# Altium schematic symbol library Regulator.SchLib: 250 symbols (part 2 of 6)
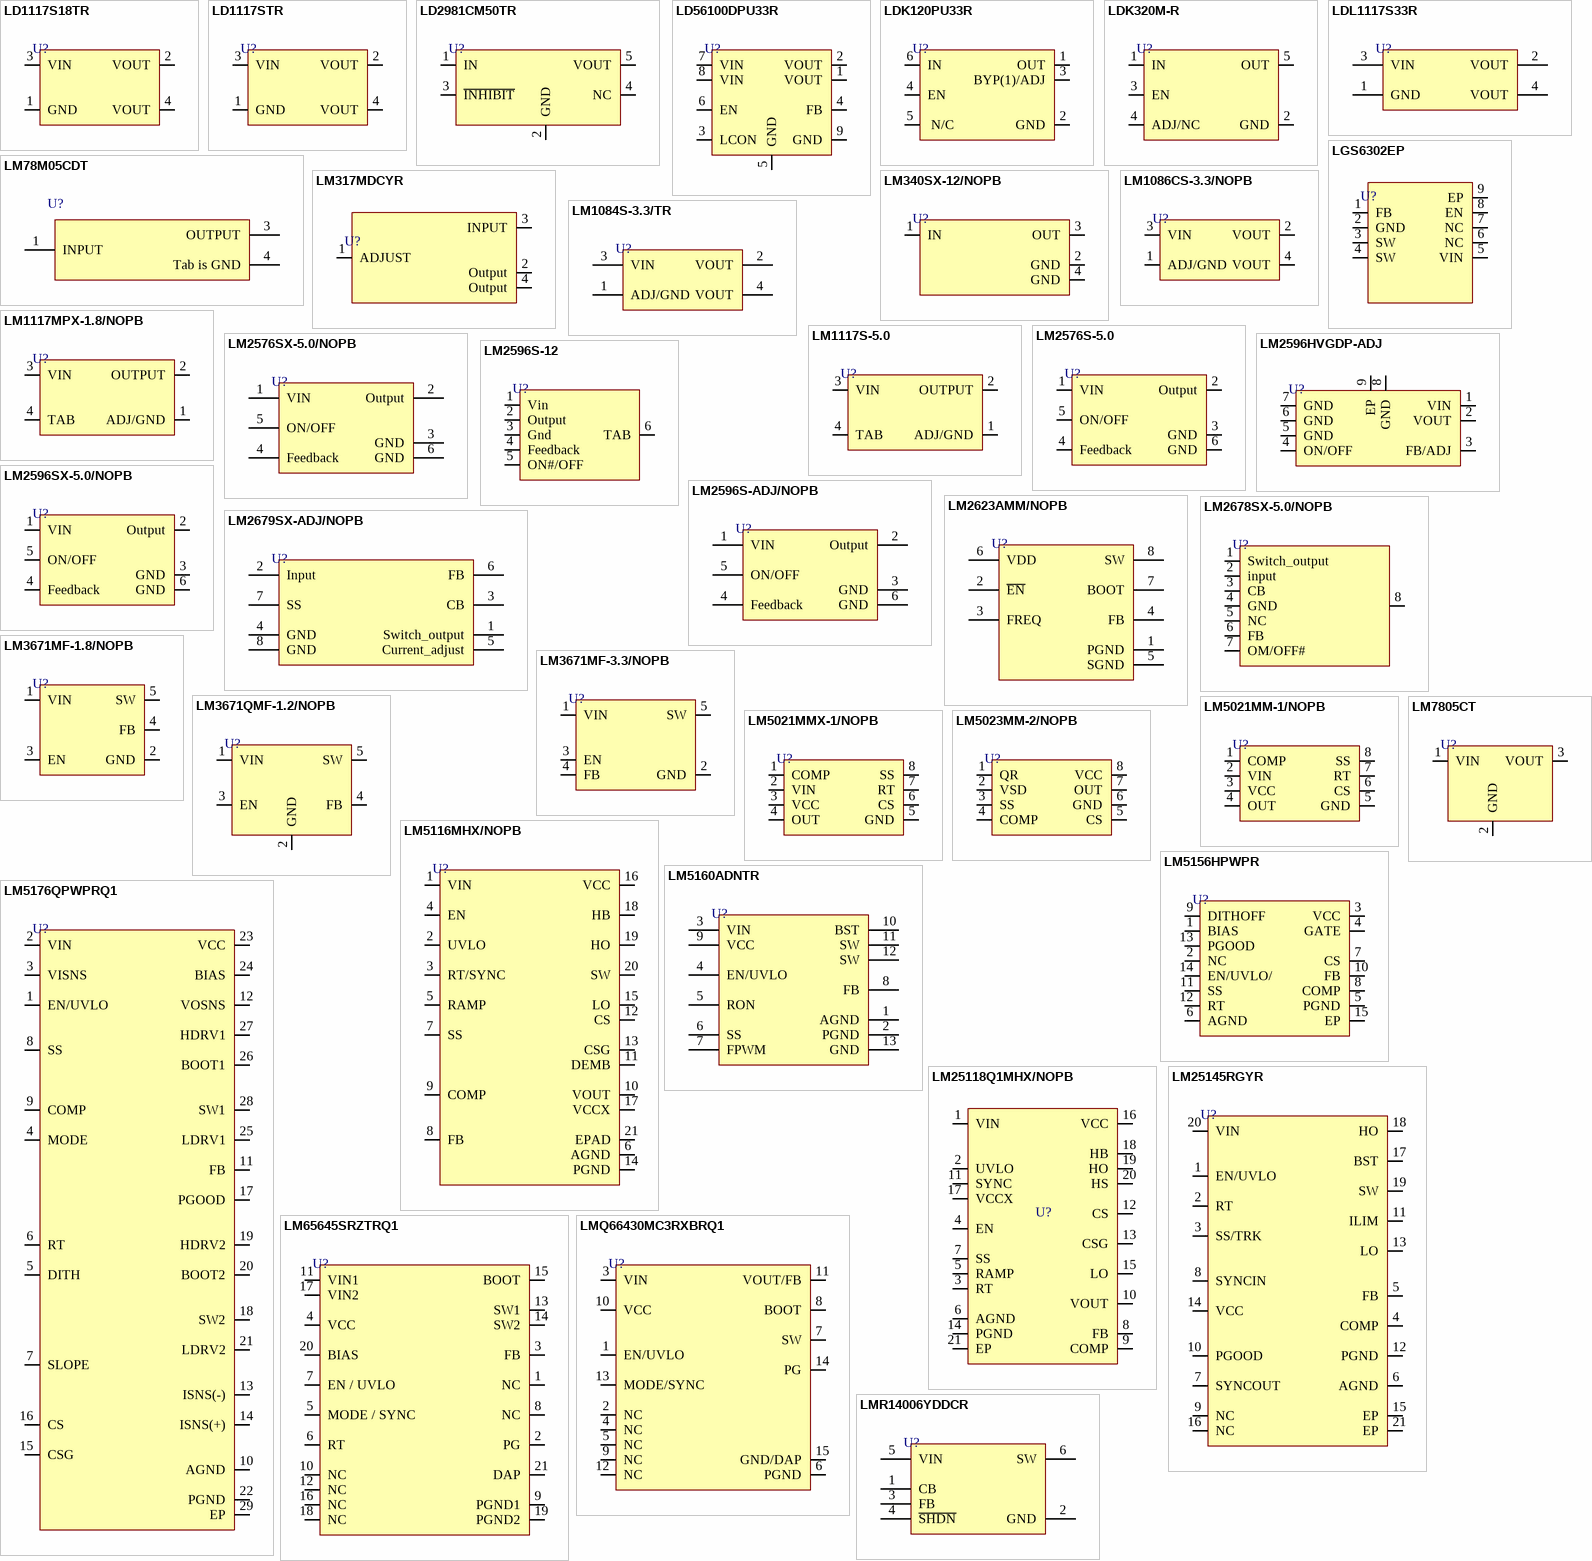
[diagram p7: symbols LD1117S18TR to LMR14006YDDCR]

## LD2981CM50TR
designator U?
LD2981 Series 100 mA 5 V Fixed Output LDO Regulator with Inhibit - SOT-23-5; Manufacturer: STMicroelectronics; Manufacturer Part Number: LD2981CM50TR; Item Type: IC; JLC Part Number: C157380; ComponentLink1Description: JLCPCB; ComponentLink1URL: https://jlcpcb.com/kr/partdetail/Stmicroelectronics-LD2981CM50TR/C157380; Supplier: Digikey; Supplier Part Number: 497-7787-1-ND; RoHS: Yes; Category: Voltage Regulators - Linear; Stock: 17151; Pricing: 1=0.93, 10=0.83, 25=0.788, 100=0.6474, 250=0.60512, 500=0.53476, 1000=0.42219 (USD); ComponentLink2URL: https://datasheet.ciiva.com/2043/cd00001635-2043543.pdf?src-supplier=Digikey; ComponentLink2Description: https://datasheet.ciiva.com/2043/cd00001635-2043543.pdf?src-supplier=Digikey; ComponentLink3URL: https://datasheet.ciiva.com/2043/cd00001635-2043544.pdf?src-supplier=Digikey; ComponentLink3Description: https://datasheet.ciiva.com/2043/cd00001635-2043544.pdf?src-supplier=Digikey; ComponentLink4URL: https://datasheet.ciiva.com/2043/cd00001635-2043545.pdf?src-supplier=Digikey; ComponentLink4Description: https://datasheet.ciiva.com/2043/cd00001635-2043545.pdf?src-supplier=Digikey; ComponentLink5URL: https://datasheet.ciiva.com/16443/cd00001635-16443657.pdf?src-supplier=Future+Electronics; ComponentLink5Description: https://datasheet.ciiva.com/16443/cd00001635-16443657.pdf?src-supplier=Future+Electronics
footprint SOT-23-5
pins: 1 IN, 2 GND, 3 ~{INHIBIT}, 4 NC, 5 VOUT

## LD56100DPU33R
designator U?
IC REG LINEAR 3.3V 1A 8DFN; Manufacturer: STMicroelectronics; Manufacturer Part Number: LD56100DPU33R; Output Type: Fixed; Output Configuration: Positive; Number of Regulators: 1; Max Supply Voltage: 5.5V; Quiescent Current: 155uA; Power Supply Rejection Ratio (PSRR): 55dB; Supplier: Mouser; LCSC Part Number: C2969937; RoHS: Yes; Item Type: IC; Pricing: 1=1.23, 10=0.751, 50=0.751, 100=0.479, 1000=0.326, 10000=0.229 (USD); Mounting Technology: Surface Mount; Case/Package: DFN; Min Operating Temperature: -40°C; Max Operating Temperature: 85°C; Packaging: Cut Tape; Min Output Voltage: 3.3V; Output Current: 1A; Series: -; RoHS Compliant: Yes; ComponentLink1URL: https://www.st.com/resource/en/datasheet/ld56100.pdf?src-supplier=Digikey; ComponentLink1Description: https://www.st.com/resource/en/datasheet/ld56100.pdf?src-supplier=Digikey
footprint Model Name (Footprint not found)
footprint DFN-8(1.2x1.6)
pins: 1 VOUT, 2 VOUT, 3 LCON, 4 FB, 5 GND, 6 EN, 7 VIN, 8 VIN, 9 GND

## LDK120PU33R
designator U?
IC REG LINEAR 3.3V 200MA 6DFN; Manufacturer: STMicroelectronics; Manufacturer Part Number: LDK120PU33R; Number of Outputs: 1; Min Input Voltage: 1.9V; Max Supply Voltage: 5.5V; Dropout Voltage: 150mV; Polarity: Positive; Quiescent Current: 60uA; Accuracy: 2%; Operating Supply Current: 50uA; Power Supply Rejection Ratio (PSRR): 55dB; Output Type: Fixed; Supplier 1: Mouser; RoHS: Yes; Category: Voltage Regulators - Linear; Stock 1: 1169; Pricing 1: 1=0.91, 10=0.752, 50=0.752, 100=0.614, 1000=0.388, 10000=0.343 (USD); Mounting Technology: Surface Mount; Case/Package: DFN; Pins: 6; Min Operating Temperature: -40°C; Max Operating Temperature: 125°C; Packaging: Tape and Reel; Max Output current: 200mA; Output Voltage: 3.3V; Output Current: 200mA; Number of Regulators: 1; Nominal Output Voltage: 3.3V; Package Quantity: 6000; Series: -; Length: 1.3mm; Width: 1.2mm; Height: 0.45mm; Radiation Hardening: No; Reach SVHC Compliant: No; Lead Free: Lead Free; RoHS Compliant: Yes; ComponentLink1URL: https://datasheet.ciiva.com/48475/dm00070790-48475005.pdf?src-supplier=Avnet; ComponentLink1Description: https://datasheet.ciiva.com/48475/dm00070790-48475005.pdf?src-supplier=Avnet; Supplier Part Number 1: 511-LDK120PU33R; LCSC Part Number: C2971162; Item Type: IC
footprint 6-DFN (1.2x1.3)
pins: 1 OUT, 2 GND, 3 BYP(1)/ADJ, 4 EN, 5  N/C, 6 IN

## LDK320M-R
designator U?
IC REG LIN POS ADJ 200MA SOT23-5; Manufacturer: STMicroelectronics; Manufacturer Part Number: LDK320M-R; Output Type: Adjustable; Output Configuration: Positive; Number of Regulators: 1; Max Supply Voltage: 18V; Min Output Voltage: 1.2V; Max Output Voltage: 12V; Quiescent Current: 90uA; Max Supply Current: 100uA; Power Supply Rejection Ratio (PSRR): 48dB; Number of Channels: 1NUMBER; Supplier: Mouser; Supplier Part Number: 511-LDK320M-R; RoHS: Yes; Category: Voltage Regulators - Linear; Stock: 45867; Pricing: 1=0.87, 10=0.776, 50=0.737, 100=0.605, 1000=0.395, 10000=0.357 (USD); Mounting Technology: Surface Mount; Case/Package: SOT-23-5; Min Operating Temperature: -40°C; Max Operating Temperature: 125°C; Packaging: Cut Tape; Output Current: 200mA; Series: -; RoHS Compliant: Yes; ComponentLink1URL: https://www.st.com/resource/en/datasheet/ldk320.pdf?src-supplier=Digikey; ComponentLink1Description: https://www.st.com/resource/en/datasheet/ldk320.pdf?src-supplier=Digikey; ComponentLink2URL: https://datasheet.octopart.com/LDK320M-R-STMicroelectronics-datasheet-164563983.pdf?src-supplier=TME; ComponentLink2Description: https://datasheet.octopart.com/LDK320M-R-STMicroelectronics-datasheet-164563983.pdf?src-supplier=TME; Item Type: IC
footprint SOT-23-5
pins: 1 IN, 2 GND, 3 EN, 4 ADJ/NC, 5 OUT

## LDL1117S33R
designator U?
IC REG LINEAR 3.3V 1.2A SOT223; Manufacturer: STMicroelectronics; Manufacturer Part Number: LDL1117S33R; Output Type: Fixed; Output Configuration: Positive; Number of Regulators: 1; Max Input Voltage: 18V; Dropout Voltage: 600mV; Quiescent Current: 500uA; Power Supply Rejection Ratio (PSRR): 65dB; Supplier 1: Digi-Key; Stock 1: 13064; Pricing 1: 1=0.45, 10=0.362, 100=0.2465, 500=0.1849, 1000=0.13867 (USD); Mount: Surface Mount; Case/Package: TO-261-4; Min Operating Temperature: -40°C; Max Operating Temperature: 125°C; Packaging: Tape and Reel; Min Output Voltage: 3.3V; Output Current: 1.2A; Supplier Part Number 1: 497-17239-6-ND; ComponentLink1Description: LCSC; ComponentLink1URL: https://www.lcsc.com/product-detail/Linear-Voltage-Regulators-LDO_STMicroelectronics-LDL1117S33R_C435835.html; LCSC Part Number: C435835; Item Type: IC
footprint SOT- 223
pins: 1 GND, 2 VOUT, 3 VIN, 4 VOUT

## LGS6302EP
designator U?
Boost type Adjustable 500mA 3V~60V 3V~60V ESOP-8 DC-DC Converters ROHS; Manufacturer: Legend-Si; Manufacturer Part Number: LGS6302EP; Item Type: IC; Package: ESOP-8; LCSC Part Number: C5280693; ComponentLink1Description: LCSC; ComponentLink1URL: https://www.lcsc.com/product-detail/DC-DC-Converters_Legend-Si-LGS6302EP_C5280693.html
footprint ESOP-8
pins: 1 FB, 2 GND, 3 SW, 4 SW, 5 VIN, 6 NC, 7 NC, 8 EN, 9 EP

## LM78M05CDT
designator U?
IC REG LINEAR 5V 500MA TO252-3; Manufacturer: TI National Semiconductor; Manufacturer Part Number: LM78M05CDT; Min Input Voltage: 7.2V; Number of Outputs: 1; Max Input Voltage: 35V; Polarity: Positive; Quiescent Current: 10mA; Output Type: Fixed; Power Supply Rejection Ratio (PSRR): 78dB; Dropout Voltage: 1.8V; Supplier 1: Digi-Key; RoHS: No; Category: Voltage Regulators - Linear; Stock 1: 815; Pricing 1: 1=2.68000, 10=2.40700, 25=2.27120, 100=1.93490, 250=1.81684, 500=1.58974, 1000=1.49975 (USD); Mount: Surface Mount; Case/Package: TO-252; Number of Pins: 3; Min Operating Temperature: -40°C; Max Operating Temperature: 125°C; Output Voltage: 5V; Packaging: Rail/Tube; Output Current: 500mA; Number of Regulators: 1; Series: -; Package Quantity: 75; Max Output Current: 500mA; Current Rating: 500mA; Length: 6.58mm; Width: 6.1mm; Height: 2.3mm; Radiation Hardening: No; Lead Free: Contains Lead; RoHS Compliant: No; ComponentLink1URL: https://datasheet.ciiva.com/26906/lm78m05cdt-26906263.pdf?src-supplier=IIIC; ComponentLink1Description: https://datasheet.ciiva.com/26906/lm78m05cdt-26906263.pdf?src-supplier=IIIC; ComponentLink2URL: https://datasheet.ciiva.com/6584/lm341-6584030.pdf?src-supplier=Digi-Key; ComponentLink2Description: https://datasheet.ciiva.com/6584/lm341-6584030.pdf?src-supplier=Digi-Key; Supplier Part Number 1: LM78M05CDT-ND; LCSC Part Number: C3744128; Item Type: IC; ComponentLink3Description: LCSC; ComponentLink3URL: https://www.lcsc.com/product-detail/Linear-Voltage-Regulators-LDO_Texas-Instruments-LM78M05CDT_C3744128.html
footprint TO-252AA
pins: 1 INPUT, 3 OUTPUT, 4 Tab is GND

## LM317MDCYR
designator U?
IC REG LIN POS ADJ 500MA SOT223; Manufacturer: Texas Instruments; Manufacturer Part Number: LM317MDCYR; Output Voltage: 37V; Number of Outputs: 1; Min Input Voltage: 4.2V; Max Supply Voltage: 40V; Polarity: Positive; Min Output Voltage: 1.25V; Quiescent Current: 3.5mA; Output Type: Adjustable; Reference Voltage: 1.3V; Power Supply Rejection Ratio (PSRR): 80dB; Supplier: Mouser; Supplier Part Number: 595-LM317MDCYR; RoHS: Yes; Category: Voltage Regulators - Linear; Stock: 12890; Pricing: 1=0.67, 10=0.564, 50=0.564, 100=0.428, 500=0.359, 1000=0.283, 2500=0.263, 5000=0.245, 10000=0.236, 25000=0.227 (USD); Mounting Technology: Surface Mount; Case/Package: SOT-223-4; Pins: 4; Weight: 0.006632oz; Min Operating Temperature: -40°C; Max Operating Temperature: 125°C; Packaging: Tape and Reel; Output Current: 500mA; Number of Regulators: 1; Max Output Voltage: 37V; Package Quantity: 1; Max Output current: 500mA; Series: -; Radiation Hardening: No; Reach SVHC Compliant: No; Lead Free: Lead Free; RoHS Compliant: Yes; ComponentLink1URL: https://datasheet.ciiva.com/1643/755612-1643356.pdf?src-supplier=Newark; ComponentLink1Description: https://datasheet.ciiva.com/1643/755612-1643356.pdf?src-supplier=Newark; ComponentLink2URL: https://datasheet.ciiva.com/41458/001014040-da-01-en-ic-reg-adj-0-5-lm317mdcyr-sot-223-4-tid-41458215.pdf?src-supplier=Conrad; ComponentLink2Description: https://datasheet.ciiva.com/41458/001014040-da-01-en-ic-reg-adj-0-5-lm317mdcyr-sot-223-4-tid-41458215.pdf?src-supplier=Conrad; ComponentLink3URL: https://datasheet.ciiva.com/1512/1814942-1512040.pdf?src-supplier=Element14; ComponentLink3Description: https://datasheet.ciiva.com/1512/1814942-1512040.pdf?src-supplier=Element14; ComponentLink4URL: https://datasheet.ciiva.com/46398/755612-46398903.pdf?src-supplier=Element14; ComponentLink4Description: https://datasheet.ciiva.com/46398/755612-46398903.pdf?src-supplier=Element14; ComponentLink5URL: https://datasheet.ciiva.com/46419/1814942-46419370.pdf?src-supplier=Element14; ComponentLink5Description: https://datasheet.ciiva.com/46419/1814942-46419370.pdf?src-supplier=Element14; ComponentLink6URL: https://datasheet.ciiva.com/2042/lm317m-2042100.pdf?src-supplier=Digikey; ComponentLink6Description: https://datasheet.ciiva.com/2042/lm317m-2042100.pdf?src-supplier=Digikey; ComponentLink7URL: https://datasheet.ciiva.com/2042/lm317m-2042099.pdf?src-supplier=Digikey; ComponentLink7Description: https://datasheet.ciiva.com/2042/lm317m-2042099.pdf?src-supplier=Digikey; ComponentLink8URL: https://datasheet.ciiva.com/2042/lm317m-2042101.pdf?src-supplier=Digikey; ComponentLink8Description: https://datasheet.ciiva.com/2042/lm317m-2042101.pdf?src-supplier=Digikey; ComponentLink9URL: https://datasheet.ciiva.com/14280/lm317mq-14280776.pdf?src-supplier=Avnet; ComponentLink9Description: https://datasheet.ciiva.com/14280/lm317mq-14280776.pdf?src-supplier=Avnet; LCSC Part Number: C840113; Item Type: IC
footprint SOT- 223
pins: 1 ADJUST, 2 Output, 3 INPUT, 4 Output

## LM340SX-12/NOPB
designator U?
IC REG LIN 12V 1.5A DDPAK/TO263; Manufacturer: TI National Semiconductor; Manufacturer Part Number: LM340SX-12/NOPB; Supplier: Mouser; Supplier Part Number: 926-LM340SX-12/NOPB; RoHS: Yes; Item Type: IC; Stock: 1516; Pricing: 1=1.86, 10=1.59, 50=1.59, 100=1.34, 1000=0.921, 10000=0.794 (USD); ComponentLink1URL: https://datasheet.ciiva.com/15111/getdatasheetpartid-88734-15111564.pdf?src-supplier=Verical; ComponentLink1Description: https://datasheet.ciiva.com/15111/getdatasheetpartid-88734-15111564.pdf?src-supplier=Verical; ComponentLink2URL: https://datasheet.ciiva.com/27051/1271515-27051800.pdf?src-supplier=Jameco; ComponentLink2Description: https://datasheet.ciiva.com/27051/1271515-27051800.pdf?src-supplier=Jameco; ComponentLink3URL: https://datasheet.ciiva.com/41458/001014071-da-01-en-ic-reg-ldo-lm340sx-12-nopb-to-263-3-tid-41458271.pdf?src-supplier=Conrad; ComponentLink3Description: https://datasheet.ciiva.com/41458/001014071-da-01-en-ic-reg-ldo-lm340sx-12-nopb-to-263-3-tid-41458271.pdf?src-supplier=Conrad; ComponentLink4URL: https://datasheet.ciiva.com/3225/lm340-n-3225397.pdf?src-supplier=Avnet; ComponentLink4Description: https://datasheet.ciiva.com/3225/lm340-n-3225397.pdf?src-supplier=Avnet; ComponentLink5URL: https://datasheet.ciiva.com/6582/lm340-n-6582405.pdf?src-supplier=Digikey; ComponentLink5Description: https://datasheet.ciiva.com/6582/lm340-n-6582405.pdf?src-supplier=Digikey; ComponentLink6URL: https://datasheet.ciiva.com/6582/lm340-n-6582409.pdf?src-supplier=Digikey; ComponentLink6Description: https://datasheet.ciiva.com/6582/lm340-n-6582409.pdf?src-supplier=Digikey
footprint TO-263 (DDPAK-3)
pins: 1 IN, 2 GND, 3 OUT, 4 GND

## LM1084S-3.3/TR
designator U?
72dB@(120Hz) 5A Fixed 3.3V~3.3V Positive 12V TO-263-3 Linear Voltage Regulators (LDO) ROHS; Manufacturer: HGSEMI; Manufacturer Part Number: LM1084S-3.3/TR; Item Type: IC; Package: TO-263-3; LCSC Part Number: C259972; ComponentLink1Description: LCSC; ComponentLink1URL: https://www.lcsc.com/product-detail/Linear-Voltage-Regulators-LDO_HGSEMI-LM1084S-3-3-TR_C259972.html
footprint TO263-3_
pins: 1 ADJ/GND, 2 VOUT, 3 VIN, 4 VOUT

## LM1086CS-3.3/NOPB
designator U?
IC REG LINEAR 3.3V 1.5A TO263; Manufacturer: Texas Instruments; Manufacturer Part Number: LM1086CS-3.3/NOPB; Manufacturer Lifecycle Status: ACTIVE; Dropout Voltage: 1.3V; Max Supply Voltage: 30V; Min Input Voltage: 2.6V; Min Supply Voltage: 4.5V; Number of Channels: 1; Output Type: Fixed; Polarity: Positive; Quiescent Current: 10mA; Supplier: Arrow Electronics; LCSC Part Number: C14089; RoHS: Compliant; Item Type: IC; Stock: 270; Pricing: 45=1.828, 90=1.693, 270=1.598 (USD); Case/Package: TO-263; Contact Plating: Tin; Current Rating: 1.5A; Height: 4.83mm; Length: 10.18mm; Lifecycle Status: Production; Max Operating Temperature: 125°C; Max Output current: 1.5A; Max Output Voltage: 3.3V; Min Current Limit: 1.5A; Min Operating Temperature: 0°C; Mounting Technology: Surface Mount; Nominal Output Voltage: 3.3V; Number of Outputs: 1; Pins: 3; Number of Regulators: 1; Output Current: 1.5A; Output Voltage: 3.3V; Radiation Hardening: No; REACH SVHC: No; Schedule B: 8542390000, 8542390000|8542390000|8542390000|8542390000|8542390000; Termination: SMD/SMT; Thickness: 4.44mm; Weight: 113.398093g; Width: 8.41mm; ComponentLink1URL: https://datasheet.octopart.com:443/LM1086CS-3.3-NOPB-Texas-Instruments-datasheet-41215742.pdf?src-supplier=Texas+Instruments; ComponentLink1Description: https://datasheet.octopart.com:443/LM1086CS-3.3-NOPB-Texas-Instruments-datasheet-41215742.pdf?src-supplier=Texas+Instruments; ComponentLink2URL: https://octopart.com:443/opatz8j6/c1?t=a347exCa5Jdd5Ftcf09fMobFq_DUHh6DUtFm8ZR_JIPVeJ8TUdO1J5FMI89k7INM3VIdi-7iQLP4Ly7ONINUWGKhaPQ4R0YZ39PsE2VeyVvTlAmeMA2ZIJicIzaU7BT608Vv_Vyv4394e6Ev5ihoaw_g95rk19j-3Z-sJBlnybAVU1Jhek7NrhHDNYvjU2z1YTHHnzE57zhCXiJnD_0HGFYRod1W4DwCQGzPZi6HHQkw3f5R6bgut_a9QGHmw3NZPa8oR58XFos3WDX9k9oJDOXYBqk14f06D3oXPeBsyEuxhORXouusdrgg2GVe8HLSMp6P2AmiTBKn0cyzAqFmRm0eOc4A-T3v5BRK7CiH_8tUwJeLTWQywLjowfbLdOKLVAtI&src-supplier=Texas+Instruments; ComponentLink2Description: https://octopart.com:443/opatz8j6/c1?t=a347exCa5Jdd5Ftcf09fMobFq_DUHh6DUtFm8ZR_JIPVeJ8TUdO1J5FMI89k7INM3VIdi-7iQLP4Ly7ONINUWGKhaPQ4R0YZ39PsE2VeyVvTlAmeMA2ZIJicIzaU7BT608Vv_Vyv4394e6Ev5ihoaw_g95rk19j-3Z-sJBlnybAVU1Jhek7NrhHDNYvjU2z1YTHHnzE57zhCXiJnD_0HGFYRod1W4DwCQGzPZi6HHQkw3f5R6bgut_a9QGHmw3NZPa8oR58XFos3WDX9k9oJDOXYBqk14f06D3oXPeBsyEuxhORXouusdrgg2GVe8HLSMp6P2AmiTBKn0cyzAqFmRm0eOc4A-T3v5BRK7CiH_8tUwJeLTWQywLjowfbLdOKLVAtI&src-supplier=Texas+Instruments; ComponentLink3URL: https://sigma.octopart.com:443/49251900/technical_drawing/Texas-Instruments-LM1086CS-3.3-NOPB.pdf?src-supplier=Texas+Instruments; ComponentLink3Description: https://sigma.octopart.com:443/49251900/technical_drawing/Texas-Instruments-LM1086CS-3.3-NOPB.pdf?src-supplier=Texas+Instruments; ComponentLink4URL: https://datasheet.octopart.com:443/LM1086CS-3.3-NOPB-Texas-Instruments-datasheet-15471669.pdf?src-supplier=Texas+Instruments; ComponentLink4Description: https://datasheet.octopart.com:443/LM1086CS-3.3-NOPB-Texas-Instruments-datasheet-15471669.pdf?src-supplier=Texas+Instruments; ComponentLink5URL: https://datasheet.octopart.com:443/LM1086CS-3.3-NOPB-Texas-Instruments-datasheet-36834605.pdf?src-supplier=Farnell; ComponentLink5Description: https://datasheet.octopart.com:443/LM1086CS-3.3-NOPB-Texas-Instruments-datasheet-36834605.pdf?src-supplier=Farnell; ComponentLink6URL: https://datasheet.octopart.com:443/LM1086CS-3.3-NOPB-Texas-Instruments-datasheet-101608863.pdf?src-supplier=Farnell; ComponentLink6Description: https://datasheet.octopart.com:443/LM1086CS-3.3-NOPB-Texas-Instruments-datasheet-101608863.pdf?src-supplier=Farnell; ComponentLink7URL: https://datasheet.octopart.com:443/LM1086CS-3.3/NOPB-Texas-Instruments-datasheet-10844283.pdf?src-supplier=Arrow+Electronics; ComponentLink7Description: https://datasheet.octopart.com:443/LM1086CS-3.3/NOPB-Texas-Instruments-datasheet-10844283.pdf?src-supplier=Arrow+Electronics; ComponentLink8URL: https://datasheet.octopart.com:443/LM1086CS-3.3/NOPB-Texas-Instruments-datasheet-403.pdf?src-supplier=element14; ComponentLink8Description: https://datasheet.octopart.com:443/LM1086CS-3.3/NOPB-Texas-Instruments-datasheet-403.pdf?src-supplier=element14; ComponentLink9URL: https://datasheet.octopart.com:443/LM1086CS-3.3-NOPB-Texas-Instruments-datasheet-27379473.pdf?src-supplier=Newark; ComponentLink9Description: https://datasheet.octopart.com:443/LM1086CS-3.3-NOPB-Texas-Instruments-datasheet-27379473.pdf?src-supplier=Newark; ComponentLink10URL: https://datasheet.octopart.com:443/LM1086CS-3.3-NOPB-Texas-Instruments-datasheet-20860893.pdf?src-supplier=Newark; ComponentLink10Description: https://datasheet.octopart.com:443/LM1086CS-3.3-NOPB-Texas-Instruments-datasheet-20860893.pdf?src-supplier=Newark; ComponentLink11URL: https://datasheet.octopart.com:443/LM1086CS-3.3-NOPB-Texas-Instruments-datasheet-58296527.pdf?src-supplier=Newark; ComponentLink11Description: https://datasheet.octopart.com:443/LM1086CS-3.3-NOPB-Texas-Instruments-datasheet-58296527.pdf?src-supplier=Newark; ComponentLink12URL: https://datasheet.octopart.com:443/LM1086CS-3.3-NOPB-Texas-Instruments-datasheet-164414912.pdf?src-supplier=Augswan; ComponentLink12Description: https://datasheet.octopart.com:443/LM1086CS-3.3-NOPB-Texas-Instruments-datasheet-164414912.pdf?src-supplier=Augswan; ComponentLink13URL: https://datasheet.octopart.com:443/LM1086CS-3.3-NOPB-Texas-Instruments-datasheet-49265093.pdf?src-supplier=element14+APAC; ComponentLink13Description: https://datasheet.octopart.com:443/LM1086CS-3.3-NOPB-Texas-Instruments-datasheet-49265093.pdf?src-supplier=element14+APAC; ComponentLink14URL: https://datasheet.octopart.com:443/LM1086CS-3.3/NOPB-National-Semiconductor-datasheet-9605593.pdf?src-supplier=RS+(Formerly+Allied+Electronics); ComponentLink14Description: https://datasheet.octopart.com:443/LM1086CS-3.3/NOPB-National-Semiconductor-datasheet-9605593.pdf?src-supplier=RS+(Formerly+Allied+Electronics); ComponentLink15URL: https://datasheet.octopart.com:443/LM1086CS-3.3-NOPB-Texas-Instruments-datasheet-7278176.pdf?src-supplier=Jameco; ComponentLink15Description: https://datasheet.octopart.com:443/LM1086CS-3.3-NOPB-Texas-Instruments-datasheet-7278176.pdf?src-supplier=Jameco; ComponentLink16URL: http://sigma.octopart.com:80/conflict_mineral_statement/Texas-Instruments-company-63.pdf?src-supplier=Compliance+Statements; ComponentLink16Description: http://sigma.octopart.com:80/conflict_mineral_statement/Texas-Instruments-company-63.pdf?src-supplier=Compliance+Statements; ComponentLink17URL: http://sigma.octopart.com:80/reach_statement/Texas-Instruments-company-64.pdf?src-supplier=Compliance+Statements; ComponentLink17Description: http://sigma.octopart.com:80/reach_statement/Texas-Instruments-company-64.pdf?src-supplier=Compliance+Statements
footprint TO-263 (DDPAK-3)
pins: 1 ADJ/GND, 2 VOUT, 3 VIN, 4 VOUT

## LM1117MPX-1.8/NOPB
designator U?
IC REG LINEAR 1.8V 800MA SOT223; Manufacturer: TI National Semiconductor; Manufacturer Part Number: LM1117MPX-1.8/NOPB; Supplier: Mouser; Supplier Part Number: 926-LM1117MPX1.8NOPB; RoHS: Yes; Category: Voltage Regulators - Linear; Stock: 3721; Pricing: 1=1.35, 10=1.15, 50=1.15, 100=0.878, 1000=0.613, 10000=0.522 (USD); Width: 3.5mm; Thickness: 1.6mm; ComponentLink1URL: https://datasheet.ciiva.com/34302/1282521-34302144.pdf?src-supplier=Jameco; ComponentLink1Description: https://datasheet.ciiva.com/34302/1282521-34302144.pdf?src-supplier=Jameco; ComponentLink2URL: https://datasheet.ciiva.com/46386/1882372-46386047.pdf?src-supplier=Element14; ComponentLink2Description: https://datasheet.ciiva.com/46386/1882372-46386047.pdf?src-supplier=Element14; ComponentLink3URL: https://datasheet.ciiva.com/3223/lm1117-n-3223527.pdf?src-supplier=Avnet; ComponentLink3Description: https://datasheet.ciiva.com/3223/lm1117-n-3223527.pdf?src-supplier=Avnet; ComponentLink4URL: https://datasheet.ciiva.com/6591/lm1117-n-6591863.pdf?src-supplier=Digikey; ComponentLink4Description: https://datasheet.ciiva.com/6591/lm1117-n-6591863.pdf?src-supplier=Digikey; ComponentLink5URL: https://datasheet.ciiva.com/6591/lm1117-n-6591864.pdf?src-supplier=Digikey; ComponentLink5Description: https://datasheet.ciiva.com/6591/lm1117-n-6591864.pdf?src-supplier=Digikey; ComponentLink6URL: https://datasheet.ciiva.com/6591/lm1117-n-6591865.pdf?src-supplier=Digikey; ComponentLink6Description: https://datasheet.ciiva.com/6591/lm1117-n-6591865.pdf?src-supplier=Digikey; LCSC Part Number: C9660; Item Type: IC
footprint SOT- 223
pins: 1 ADJ/GND, 2 OUTPUT, 3 VIN, 4 TAB

## LM1117S-5.0
designator U?
75dB@(120Hz) 1A Fixed 5V Positive electrode 12V SOT-223-3 Linear Voltage Regulators (LDO) ROHS; Manufacturer: HTC Korea TAEJIN Tech; Manufacturer Part Number: LM1117S-5.0; Package: SOT-223-3; LCSC Part Number: C126028; Item Type: LDO; ComponentLink1Description: LCSC; ComponentLink1URL: https://www.lcsc.com/product-detail/Linear-Voltage-Regulators-LDO_HTC-Korea-TAEJIN-Tech-LM1117S-5-0_C126028.html
footprint SOT- 223
pins: 1 ADJ/GND, 2 OUTPUT, 3 VIN, 4 TAB

## LM2576S-5.0
designator U?
Step-down type Fixed 40V 5V 3A TO-263-5 DC-DC Converters ROHS; Manufacturer: TI National Semiconductor; Manufacturer Part Number: LM2576S-5.0; Item Type: IC; Switching Frequency: 52kHz; Quiescent Current: 5mA; Number of Outputs: 1; Min Input Voltage: 4V; Synchronous Rectifier: No; Output Configuration: Positive; Supplier: Mouser; LCSC Part Number: C347413; RoHS: No; Stock: 431; Pricing: 1=6.1, 10=5.48, 50=5.48, 100=4.58, 1000=4.27, 10000=3.85 (USD); Mounting Technology: Surface Mount; Case/Package: TO-263-5; Pins: 5; Min Operating Temperature: -40°C; Max Operating Temperature: 125°C; Packaging: Rail/Tube; Output Voltage: 5V; Output Current: 3A; Package Quantity: 45; Max Supply Voltage: 40V; Output Type: Fixed; Series: SIMPLE SWITCHER®; Min Output Voltage: 5V; Lead Free: Contains Lead; RoHS Compliant: No; ComponentLink1URL: http://www.mouser.com/ds/2/405/snvs107c-317001.pdf?src-supplier=Mouser; ComponentLink1Description: http://www.mouser.com/ds/2/405/snvs107c-317001.pdf?src-supplier=Mouser; ComponentLink2URL: http://components.arrow.com/part/dataview/659311S2342416N1317?src-supplier=Arrow+Electronics; ComponentLink2Description: http://components.arrow.com/part/dataview/659311S2342416N1317?src-supplier=Arrow+Electronics; ComponentLink3URL: http://www.ti.com/lit/ds/symlink/lm2576hv.pdf?src-supplier=Digikey; ComponentLink3Description: http://www.ti.com/lit/ds/symlink/lm2576hv.pdf?src-supplier=Digikey
footprint TO-263-5 (D2PAK)
pins: 1 VIN, 2 Output, 3 GND, 4 Feedback, 5 ON/OFF, 6 GND

## LM2576SX-5.0/NOPB
designator U?
IC REG BUCK 5V 3A TO263-5; Manufacturer: TI National Semiconductor; Manufacturer Part Number: LM2576SX-5.0/NOPB; Switching Frequency: 52kHz; Quiescent Current: 5mA; Number of Outputs: 1; Efficiency: 77%; Min Input Voltage: 4V; Max Supply Voltage: 40V; Synchronous Rectifier: No; Output Type: Fixed; Supplier 1: Mouser; RoHS: Yes; Category: Voltage Regulators - Switching; Stock 1: 734; Pricing 1: 1=4.06000, 10=3.64000, 50=3.44000, 100=2.98000, 1000=2.54000, 10000=2.54000 (USD); Mounting Technology: Surface Mount; Case/Package: TO-263-6; Pins: 5; Min Operating Temperature: -40°C; Max Operating Temperature: 125°C; Packaging: Tape and Reel; Output Voltage: 5V; Output Current: 3A; Series: SIMPLE SWITCHER®; Nominal Output Voltage: 5V; Reach SVHC Compliant: No; Lead Free: Contains Lead; RoHS Compliant: Yes; ComponentLink1URL: https://datasheet.ciiva.com/41457/001013741-da-01-en-ic-reg-bu-lm2576sx-5-0-nopb-to-263-5-tid-41457614.pdf?src-supplier=Conrad; ComponentLink1Description: https://datasheet.ciiva.com/41457/001013741-da-01-en-ic-reg-bu-lm2576sx-5-0-nopb-to-263-5-tid-41457614.pdf?src-supplier=Conrad; Supplier Part Number 1: 926-LM2576SX-5.0NOPB; LCSC Part Number: C34465; Item Type: IC
footprint TO-263-5 (D2PAK)
pins: 1 VIN, 2 Output, 3 GND, 4 Feedback, 5 ON/OFF, 6 GND

## LM2596HVGDP-ADJ
designator U?
Converter DC/DC; buck; Vout: 1.23-57V; Vin: 4.5-60V; 3A; 150kHz; -40+125 deg.C; SMD; SOP8PP; Manufacturer: Tae Jin Technology; Manufacturer Part Number: LM2596HVGDP-ADJ; Item Type: IC; Number of Channels: 1NUMBER; Supplier: LCSC; LCSC Part Number: C2902317; RoHS: No; RoHS Compliant: No
footprint SOP-8-EP
pins: 1 VIN, 2 VOUT, 3 FB/ADJ, 4 ON/OFF, 5 GND, 6 GND, 7 GND, 8 GND, 9 EP

## LM2596S-12
designator U?
Step-down type Fixed 12V 40V 3A TO-263-5 DC-DC Converters ROHS; Manufacturer: UMW(Youtai Semiconductor); Manufacturer Part Number: LM2596S-12; Item Type: IC; Supplier: Digikey; LCSC Part Number: C347422; RoHS: No; Stock: 957; Pricing: 1=3.2, 10=2.876, 25=2.7184, 100=2.356, 250=2.2352 (USD)
footprint TO-263-5 (D2PAK)
pins: 1 Vin, 2 Output, 3 Gnd, 4 Feedback, 5 ON#/OFF, 6 TAB

## LM2596S-ADJ/NOPB
designator U?
IC REG BUCK ADJ 3A TO263-5; Manufacturer: TI National Semiconductor; Manufacturer Part Number: LM2596S-ADJ/NOPB; Number of Outputs: 1; Output Voltage: 37V; Min Input Voltage: 4.5V; Max Input Voltage: 40V; Switching Frequency: 173kHz; Efficiency: 73%; Min Output Voltage: 1.2V; Quiescent Current: 5mA; Output Type: Adjustable; Supplier 1: Mouser; RoHS: Yes; Category: Voltage Regulators - Switching; Pricing 1: 1=7.15000, 10=6.46000, 50=6.16000, 100=5.34000, 1000=5.10000, 10000=5.10000 (USD); Mount: Surface Mount; Case/Package: TO-263; Number of Pins: 5; Weight: 0.056128oz; Contact Plating: Tin,Matte; Min Operating Temperature: -40°C; Max Operating Temperature: 125°C; Max Output Current: 3A; Packaging: Rail/Tube; Output Current: 3A; Operating Supply Voltage: 40V; Series: LM2596; Max Output Voltage: 37V; Length: 10.16mm; Width: 8.64mm; Height: 4.57mm; Radiation Hardening: No; Lead Free: Contains Lead; Reach SVHC Compliant: Yes; RoHS Compliant: Yes; ComponentLink1URL: https://datasheet.ciiva.com/27056/2051160-27056491.pdf?src-supplier=Jameco; ComponentLink1Description: https://datasheet.ciiva.com/27056/2051160-27056491.pdf?src-supplier=Jameco; ComponentLink2URL: https://datasheet.ciiva.com/15112/getdatasheetpartid-55559-15112636.pdf?src-supplier=Verical; ComponentLink2Description: https://datasheet.ciiva.com/15112/getdatasheetpartid-55559-15112636.pdf?src-supplier=Verical; ComponentLink3URL: https://datasheet.ciiva.com/41457/001013814-da-01-en-ic-reg-buc-lm2596s-adj-nopb-to-263-5-tid-41457756.pdf?src-supplier=Conrad; ComponentLink3Description: https://datasheet.ciiva.com/41457/001013814-da-01-en-ic-reg-buc-lm2596s-adj-nopb-to-263-5-tid-41457756.pdf?src-supplier=Conrad; ComponentLink4URL: https://datasheet.ciiva.com/22669/1874590-22669464.pdf?src-supplier=Element14; ComponentLink4Description: https://datasheet.ciiva.com/22669/1874590-22669464.pdf?src-supplier=Element14; ComponentLink5URL: https://datasheet.ciiva.com/14150/jqlm2596x-xx-e-14150653.pdf?src-supplier=Distrelec; ComponentLink5Description: https://datasheet.ciiva.com/14150/jqlm2596x-xx-e-14150653.pdf?src-supplier=Distrelec; ComponentLink6URL: https://datasheet.ciiva.com/6596/lm2596-6596342.pdf?src-supplier=Digi-Key; ComponentLink6Description: https://datasheet.ciiva.com/6596/lm2596-6596342.pdf?src-supplier=Digi-Key; Supplier Part Number 1: 926-LM2596S-ADJ/NOPB; LCSC Part Number: C1355333; Item Type: IC
footprint DDPAK
pins: 1 VIN, 2 Output, 3 GND, 4 Feedback, 5 ON/OFF, 6 GND

## LM2596SX-5.0/NOPB
designator U?
IC REG BUCK 5V 3A TO263; Manufacturer: TI National Semiconductor; Manufacturer Part Number: LM2596SX-5.0/NOPB; Min Input Voltage: 4.5V; Max Supply Voltage: 40V; Number of Outputs: 1; Switching Frequency: 150kHz; Efficiency: 80%; Synchronous Rectifier: No; Quiescent Current: 5mA; Output Type: Fixed; Output Configuration: Positive; Number of Channels: 1NUMBER; Supplier: Mouser; LCSC Part Number: C10002; RoHS: Yes; Item Type: IC; Stock: 2657; Pricing: 1=5.76, 10=4.08, 50=4.08, 100=3.71, 1000=3.28, 10000=3.28 (USD); Mounting Technology: Surface Mount; Case/Package: TO-263; Pins: 5; Min Operating Temperature: -40°C; Max Operating Temperature: 125°C; Output Voltage: 5V; Output Current: 3A; Packaging: Tape and Reel; Package Quantity: 500; Nominal Output Voltage: 5V; Min Output Voltage: 5V; Series: SIMPLE SWITCHER®; Thickness: 4.58mm; Reach SVHC Compliant: No; Lead Free: Contains Lead
footprint DDPAK
pins: 1 VIN, 2 Output, 3 GND, 4 Feedback, 5 ON/OFF, 6 GND

## LM2623AMM/NOPB
designator U?
IC REG BOOST ADJ 2.2A 8VSSOP; Manufacturer: TI National Semiconductor; Manufacturer Part Number: LM2623AMM/NOPB; Output Voltage: 14V; Output Current: 2A; Switching Frequency: 2MHz; Min Supply Voltage: 800mV; Efficiency: 87%; Number of Outputs: 1; Min Output Voltage: 1.24V; Quiescent Current: 80uA; Output Type: Adjustable; Output Configuration: Positive; Synchronous Rectifier: No; Nominal Supply Current: 16mA; Output Power: 500mW; Supplier 1: Mouser; RoHS: Yes; Category: Voltage Regulators - Switching; Stock 1: 1022; Pricing 1: 1=1.99000, 10=1.79000, 50=1.69000, 100=1.44000, 1000=0.98000, 10000=0.89300 (USD); Mounting Technology: Surface Mount; Case/Package: MSOP; Pins: 8; Weight: 0.004938oz; Min Operating Temperature: -40°C; Max Operating Temperature: 85°C; Package Quantity: 1000; Min Input Voltage: 800mV; Packaging: Tape and Reel; Max Output current: 2A; Max Supply Voltage: 14V; Max Output Voltage: 14V; Topology: Boost; Series: -; Length: 3mm; Width: 3.1mm; Height: 0.86mm; Radiation Hardening: No; Reach SVHC Compliant: Yes; Lead Free: Lead Free; Supplier Part Number 1: 926-LM2623AMM/NOPB; LCSC Part Number: C330402; Item Type: IC
footprint VSSOP-8-0.65mm
pins: 1 PGND, 2 ~{EN}, 3 FREQ, 4 FB, 5 SGND, 6 VDD, 7 BOOT, 8 SW

## LM2678SX-5.0/NOPB
designator U?
IC REG BUCK 5V 5A TO263-7; Manufacturer: TI National Semiconductor; Manufacturer Part Number: LM2678SX-5.0/NOPB; Supplier: Digikey; Supplier Part Number: LM2678SX-5.0/NOPBCT-ND; RoHS: Yes; Item Type: IC; Stock: 900; Pricing: 1=6.31, 10=5.663, 25=5.354, 100=4.6401, 250=4.4022 (USD); ComponentLink1URL: https://datasheet.ciiva.com/6607/lm2678-6607112.pdf?src-supplier=Digikey; ComponentLink1Description: https://datasheet.ciiva.com/6607/lm2678-6607112.pdf?src-supplier=Digikey; ComponentLink2URL: https://datasheet.ciiva.com/6607/lm2678-6607114.pdf?src-supplier=Digikey; ComponentLink2Description: https://datasheet.ciiva.com/6607/lm2678-6607114.pdf?src-supplier=Digikey; ComponentLink3URL: https://datasheet.ciiva.com/6607/lm2678-6607118.pdf?src-supplier=Digikey; ComponentLink3Description: https://datasheet.ciiva.com/6607/lm2678-6607118.pdf?src-supplier=Digikey; LCSC Part Number: C544694
footprint TO-263-7
pins: 1 Switch_output, 2 input, 3 CB, 4 GND, 5 NC, 6 FB, 7 OM/OFF#, 8

## LM2679SX-ADJ/NOPB
designator U?
IC REG BUCK ADJ 5A TO263-7; Manufacturer: TI National Semiconductor; Manufacturer Part Number: LM2679SX-ADJ/NOPB; Min Input Voltage: 8V; Number of Outputs: 1; Output Voltage: 37V; Efficiency: 84%; Max Supply Voltage: 40V; Switching Frequency: 260kHz; Quiescent Current: 4.2mA; Output Type: Adjustable; Synchronous Rectifier: No; Supplier 1: Mouser; RoHS: Yes; Category: Voltage Regulators - Switching; Stock 1: 3995; Pricing 1: 1=6.97, 10=6.26, 50=5.92, 100=5.13, 1000=3.72, 10000=3.72 (USD); Mounting Technology: Surface Mount; Case/Package: TO-263; Min Operating Temperature: -40°C; Max Operating Temperature: 125°C; Packaging: Tape and Reel; Output Current: 5A; Series: SIMPLE SWITCHER®; Package Quantity: 500; Min Supply Voltage: 8V; Lead Free: Contains Lead; RoHS Compliant: Yes; ComponentLink1URL: https://datasheet.ciiva.com/6596/lm2679-6596695.pdf?src-supplier=Digi-Key; ComponentLink1Description: https://datasheet.ciiva.com/6596/lm2679-6596695.pdf?src-supplier=Digi-Key; ComponentLink2URL: https://datasheet.ciiva.com/6596/lm2679-6596699.pdf?src-supplier=Digi-Key; ComponentLink2Description: https://datasheet.ciiva.com/6596/lm2679-6596699.pdf?src-supplier=Digi-Key; ComponentLink3URL: https://datasheet.ciiva.com/6596/lm2679-6596693.pdf?src-supplier=Digi-Key; ComponentLink3Description: https://datasheet.ciiva.com/6596/lm2679-6596693.pdf?src-supplier=Digi-Key; ComponentLink4URL: https://datasheet.ciiva.com/41457/001013915-da-01-en-ic-reg-bu-lm2679sx-adj-nopb-to-263-7-tid-41457948.pdf?src-supplier=Conrad; ComponentLink4Description: https://datasheet.ciiva.com/41457/001013915-da-01-en-ic-reg-bu-lm2679sx-adj-nopb-to-263-7-tid-41457948.pdf?src-supplier=Conrad; Supplier Part Number 1: 926-LM2679SXADJNOPB; LCSC Part Number: C2877272; Item Type: IC
footprint TO-263-7
pins: 1 Switch_output, 2 Input, 3 CB, 4 GND, 5 Current_adjust, 6 FB, 7 SS, 8 GND

## LM3671MF-1.8/NOPB
designator U?
IC REG BUCK 1.8V 600MA SOT23-5; Manufacturer: TI National Semiconductor; Manufacturer Part Number: LM3671MF-1.8/NOPB; Supplier: Mouser; Supplier Part Number: 926-LM3671MF-1.8NOPB; RoHS: Yes; Item Type: IC; Pricing: 1=1.21, 10=1.07, 50=1.07, 100=0.962, 1000=0.766, 10000=0.703 (USD); ComponentLink1URL: https://datasheet.ciiva.com/25627/0900766b810fa54f-25627509.pdf?src-supplier=Rs; ComponentLink1Description: https://datasheet.ciiva.com/25627/0900766b810fa54f-25627509.pdf?src-supplier=Rs; ComponentLink2URL: https://datasheet.ciiva.com/15113/getdatasheetpartid-147216-15113223.pdf?src-supplier=Verical; ComponentLink2Description: https://datasheet.ciiva.com/15113/getdatasheetpartid-147216-15113223.pdf?src-supplier=Verical; ComponentLink3URL: https://datasheet.ciiva.com/22687/1882649-22687462.pdf?src-supplier=Element14; ComponentLink3Description: https://datasheet.ciiva.com/22687/1882649-22687462.pdf?src-supplier=Element14; ComponentLink4URL: https://datasheet.ciiva.com/3220/lm3671-3220955.pdf?src-supplier=Avnet; ComponentLink4Description: https://datasheet.ciiva.com/3220/lm3671-3220955.pdf?src-supplier=Avnet; ComponentLink5URL: https://datasheet.ciiva.com/3220/lm3671-3220956.pdf?src-supplier=Avnet; ComponentLink5Description: https://datasheet.ciiva.com/3220/lm3671-3220956.pdf?src-supplier=Avnet; ComponentLink6URL: https://datasheet.ciiva.com/22756/1781731-22756527.pdf?src-supplier=Farnell; ComponentLink6Description: https://datasheet.ciiva.com/22756/1781731-22756527.pdf?src-supplier=Farnell
footprint SOT-23-5
pins: 1 VIN, 2 GND, 3 EN, 4 FB, 5 SW

## LM3671MF-3.3/NOPB
designator U?
IC REG BUCK 3.3V 600MA SOT23-5; Manufacturer: Texas Instruments; Manufacturer Part Number: LM3671MF-3.3/NOPB; Supplier: Mouser; Supplier Part Number: 926-LM3671MF-3.3NOPB; RoHS: Yes; Category: Voltage Regulators - Switching; Stock: 4696; Pricing: 1=1.66, 10=1.41, 50=1.41, 100=1.2, 1000=0.815, 10000=0.703 (USD); ComponentLink1URL: https://datasheet.ciiva.com/46382/1882649-46382616.pdf?src-supplier=Element14; ComponentLink1Description: https://datasheet.ciiva.com/46382/1882649-46382616.pdf?src-supplier=Element14; ComponentLink2URL: https://datasheet.ciiva.com/46425/1761249-46425739.pdf?src-supplier=Element14; ComponentLink2Description: https://datasheet.ciiva.com/46425/1761249-46425739.pdf?src-supplier=Element14; Item Type: IC
footprint SOT-23-5
pins: 1 VIN, 2 GND, 3 EN, 4 FB, 5 SW

## LM3671QMF-1.2/NOPB
designator U?
IC REG BUCK 1.2V 0.6A SYNC SOT23; Manufacturer: Texas Instruments; Manufacturer Part Number: LM3671QMF-1.2/NOPB; Supplier 1: Digikey; RoHS: Yes; Item Type: IC; Stock 1: 4627; Pricing 1: 1=1.91, 10=1.713, 25=1.616, 100=1.3768, 250=1.2928, 500=1.1312 (USD); ComponentLink1URL: https://datasheet.ciiva.com/6603/lm3671-6603941.pdf?src-supplier=Digikey; ComponentLink1Description: https://datasheet.ciiva.com/6603/lm3671-6603941.pdf?src-supplier=Digikey; LCSC Part Number: C2071095; Supplier Part Number 1: 296-49720-1-ND
footprint SOT-23-5
pins: 1 VIN, 2 GND, 3 EN, 4 FB, 5 SW

## LM5021MM-1/NOPB
designator U?
145kHz 7.25V~30V VSSOP-8-0.65mm AC-DC Controllers and Regulators ROHS; Manufacturer: TI National Semiconductor; Manufacturer Part Number: LM5021MM-1/NOPB; Item Type: IC; Frequency: 500kHz; Output Voltage: 600mV; Output Current: 100mA; Switching Frequency: 1MHz; Quiescent Current: 2.5mA; Topology: Flyback; Max Supply Voltage: 30V; Min Supply Voltage: 8V; Rise Time: 25ns; Fall Time: 10ns; Duty Cycle: 80%; Nominal Supply Voltage: 15V; Supplier: Mouser; LCSC Part Number: C202233; RoHS: Yes; Stock: 1237; Pricing: 1=1.4, 10=1.04, 50=1.04, 100=0.968, 1000=0.887, 10000=0.856 (USD); Mounting Technology: Surface Mount; Case/Package: MSOP; Pins: 8; Min Operating Temperature: -40°C; Max Operating Temperature: 125°C; Packaging: Tape and Reel; Termination: SMD/SMT; Series: -; Thickness: 970um; Reach SVHC Compliant: No; Lead Free: Lead Free; RoHS Compliant: Yes; ComponentLink1URL: https://datasheet.ciiva.com/1513/1771307-1513330.pdf?src-supplier=Element14; ComponentLink1Description: https://datasheet.ciiva.com/1513/1771307-1513330.pdf?src-supplier=Element14; ComponentLink2URL: https://datasheet.ciiva.com/49118/1767118-49118582.pdf?src-supplier=Element14; ComponentLink2Description: https://datasheet.ciiva.com/49118/1767118-49118582.pdf?src-supplier=Element14; ComponentLink3URL: https://datasheet.ciiva.com/49118/1767118-49118263.pdf?src-supplier=Element14; ComponentLink3Description: https://datasheet.ciiva.com/49118/1767118-49118263.pdf?src-supplier=Element14; ComponentLink4URL: https://datasheet.ciiva.com/46389/1888908-46389836.pdf?src-supplier=Element14; ComponentLink4Description: https://datasheet.ciiva.com/46389/1888908-46389836.pdf?src-supplier=Element14; ComponentLink5URL: https://datasheet.ciiva.com/6613/lm5021-6613338.pdf?src-supplier=Digikey; ComponentLink5Description: https://datasheet.ciiva.com/6613/lm5021-6613338.pdf?src-supplier=Digikey; ComponentLink6URL: https://datasheet.ciiva.com/6613/lm5021-6613340.pdf?src-supplier=Digikey; ComponentLink6Description: https://datasheet.ciiva.com/6613/lm5021-6613340.pdf?src-supplier=Digikey; ComponentLink7URL: https://datasheet.ciiva.com/6613/lm5021-6613336.pdf?src-supplier=Digikey; ComponentLink7Description: https://datasheet.ciiva.com/6613/lm5021-6613336.pdf?src-supplier=Digikey
footprint VSSOP-8-0.65mm
pins: 1 COMP, 2 VIN, 3 VCC, 4 OUT, 5 GND, 6 CS, 7 RT, 8 SS

## LM5021MMX-1/NOPB
designator U?
IC OFFLINE SWITCH FLYBACK 8VSSOP; Manufacturer: TI National Semiconductor; Manufacturer Part Number: LM5021MMX-1/NOPB; Number of Channels: 1NUMBER; Supplier: Mouser; LCSC Part Number: C2872420; RoHS: Yes; Item Type: IC; Stock: 10661; Pricing: 1=1.57, 10=1.04, 50=1.04, 100=0.924, 1000=0.808, 10000=0.73 (USD); Length: 3mm; Width: 3mm; Thickness: 970um; Lead Free: 5697LeadFree; ComponentLink1URL: https://datasheet.ciiva.com/6613/lm5021-6613621.pdf?src-supplier=Digikey; ComponentLink1Description: https://datasheet.ciiva.com/6613/lm5021-6613621.pdf?src-supplier=Digikey; ComponentLink2URL: https://datasheet.ciiva.com/6613/lm5021-6613624.pdf?src-supplier=Digikey; ComponentLink2Description: https://datasheet.ciiva.com/6613/lm5021-6613624.pdf?src-supplier=Digikey; ComponentLink3URL: https://datasheet.ciiva.com/14265/lm5021-14265403.pdf?src-supplier=Avnet; ComponentLink3Description: https://datasheet.ciiva.com/14265/lm5021-14265403.pdf?src-supplier=Avnet
footprint VSSOP-8-0.65mm
pins: 1 COMP, 2 VIN, 3 VCC, 4 OUT, 5 GND, 6 CS, 7 RT, 8 SS

## LM5023MM-2/NOPB
designator U?
IC OFFLINE SWITCH FLYBACK 8VSSOP; Manufacturer: Texas Instruments; Manufacturer Part Number: LM5023MM-2/NOPB; Min Supply Voltage: 8V; Max Supply Voltage: 14V; Frequency: 130kHz; Rise Time: 25ns; Number of Outputs: 1; Max Duty Cycle: 50%; Fall Time: 15ns; Operating Supply Current: 800uA; Duty Cycle: 0%; Fault Protection: Over Voltage; Supplier: Mouser; LCSC Part Number: C2871051; RoHS: Yes; Item Type: IC; Stock: 1589; Pricing: 1=1.17, 10=0.891, 50=0.891, 100=0.811, 1000=0.643, 10000=0.627 (USD); Mounting Technology: Surface Mount; Case/Package: VSSOP; Pins: 8; Min Operating Temperature: -40°C; Max Operating Temperature: 125°C; Packaging: Cut Tape; Switching Frequency: 130kHz; Package Quantity: 1000; Topology: Flyback; Series: -; Nominal Supply Current: 800uA; Length: 3mm; Width: 3mm; Height: 1.07mm; Thickness: 970um; Radiation Hardening: No; Reach SVHC Compliant: No; Lead Free: Lead Free; RoHS Compliant: Yes; ComponentLink1URL: https://datasheet.ciiva.com/23940/1752268-23940537.pdf?src-supplier=Newark; ComponentLink1Description: https://datasheet.ciiva.com/23940/1752268-23940537.pdf?src-supplier=Newark; ComponentLink2URL: https://datasheet.ciiva.com/30018/lm5023-30018293.pdf?src-supplier=Avnet; ComponentLink2Description: https://datasheet.ciiva.com/30018/lm5023-30018293.pdf?src-supplier=Avnet; ComponentLink3URL: https://datasheet.ciiva.com/22748/1804927-22748090.pdf?src-supplier=Element14; ComponentLink3Description: https://datasheet.ciiva.com/22748/1804927-22748090.pdf?src-supplier=Element14; ComponentLink4URL: https://datasheet.ciiva.com/29610/lm5023-29610235.pdf?src-supplier=Digikey; ComponentLink4Description: https://datasheet.ciiva.com/29610/lm5023-29610235.pdf?src-supplier=Digikey; ComponentLink5URL: https://datasheet.ciiva.com/29610/lm5023-29610236.pdf?src-supplier=Digikey; ComponentLink5Description: https://datasheet.ciiva.com/29610/lm5023-29610236.pdf?src-supplier=Digikey; ComponentLink6URL: https://datasheet.ciiva.com/18617/lm5023-18617703.pdf?src-supplier=Digikey; ComponentLink6Description: https://datasheet.ciiva.com/18617/lm5023-18617703.pdf?src-supplier=Digikey; ComponentLink7URL: https://datasheet.ciiva.com/30018/lm5023-30018294.pdf?src-supplier=Avnet; ComponentLink7Description: https://datasheet.ciiva.com/30018/lm5023-30018294.pdf?src-supplier=Avnet
footprint VSSOP-8-0.65mm
pins: 1 QR, 2 VSD, 3 SS, 4 COMP, 5 CS, 6 GND, 7 OUT, 8 VCC

## LM5116MHX/NOPB
designator U?
IC REG CTRLR BUCK 20TSSOP; Manufacturer: TI National Semiconductor; Manufacturer Part Number: LM5116MHX/NOPB; Number of Channels: 1NUMBER; Max Duty Cycle: 98%; Supplier: Mouser; LCSC Part Number: C13755; RoHS: Yes; Item Type: IC; Stock: 9134; Pricing: 1=6.26, 10=5.3, 50=5.3, 100=4.59, 1000=3.26, 10000=3.14 (USD); Length: 6.5mm; Height: 1.2mm; Lead Free: 5697LeadFree; ComponentLink1URL: https://datasheet.ciiva.com/3217/lm5116-3217294.pdf?src-supplier=Avnet; ComponentLink1Description: https://datasheet.ciiva.com/3217/lm5116-3217294.pdf?src-supplier=Avnet; ComponentLink2URL: https://datasheet.ciiva.com/6596/lm5116-6596552.pdf?src-supplier=Digikey; ComponentLink2Description: https://datasheet.ciiva.com/6596/lm5116-6596552.pdf?src-supplier=Digikey; ComponentLink3URL: https://datasheet.ciiva.com/6596/lm5116-6596553.pdf?src-supplier=Digikey; ComponentLink3Description: https://datasheet.ciiva.com/6596/lm5116-6596553.pdf?src-supplier=Digikey; ComponentLink4URL: https://datasheet.ciiva.com/6596/lm5116-6596565.pdf?src-supplier=Digikey; ComponentLink4Description: https://datasheet.ciiva.com/6596/lm5116-6596565.pdf?src-supplier=Digikey
footprint 20-HTSSOP
pins: 1 VIN, 2 UVLO, 3 RT/SYNC, 4 EN, 5 RAMP, 6 AGND, 7 SS, 8 FB, 9 COMP, 10 VOUT, 11 DEMB, 12 CS, 13 CSG, 14 PGND, 15 LO, 16 VCC, 17 VCCX, 18 HB, 19 HO, 20 SW, 21 EPAD

## LM5156HPWPR
designator U?
2.2MHZ WIDE INPUT NONSYNCHRONOUS; Manufacturer: Texas Instruments; Manufacturer Part Number: LM5156HPWPR; Item Type: IC; Supplier: Digikey; LCSC Part Number: C2867852; RoHS: No; Stock: 2799; Pricing: 1=2.18, 10=1.954, 25=1.8432, 100=1.5704, 250=1.4746, 500=1.29028, 1000=1.06908 (USD)
footprint HTSSOP-14-EP
pins: 1 BIAS, 2 NC, 3 VCC, 4 GATE, 5 PGND, 6 AGND, 7 CS, 8 COMP, 9 DITHOFF, 10 FB, 11 SS, 12 RT, 13 PGOOD, 14 EN/UVLO/, 15 EP

## LM5160ADNTR
designator U?
IC REG BUCK FLYBCK ADJ 12WSON; Manufacturer: Texas Instruments; Manufacturer Part Number: LM5160ADNTR; Number of Outputs: 1; Min Input Voltage: 4.5V; Max Input Voltage: 65V; Min Output Voltage: 2V; Max Output Voltage: 60V; Output Current: 1.5A; Switching Frequency: 1MHz; Synchronous Rectifier: Yes; Quiescent Current: 2.3mA; Topology: Flyback; Output Type: Adjustable; Supplier 1: Digi-Key; RoHS: Yes; Category: Power Supply Modules; Pricing 1: 1=5.87000, 10=5.27300, 25=4.98480, 100=4.32000, 250=4.09848, 500=3.67756 (USD); Mount: Surface Mount; Min Operating Temperature: -40°C; Max Operating Temperature: 125°C; Packaging: Tape and Reel; Lead Free: Lead Free; RoHS Compliant: Yes; ComponentLink1URL: http://www.ti.com/lit/ds/symlink/lm5160a.pdf?src-supplier=Digi-Key; ComponentLink1Description: http://www.ti.com/lit/ds/symlink/lm5160a.pdf?src-supplier=Digi-Key; ComponentLink2URL: http://www.ti.com/general/docs/suppproductinfo.tsp?distId=10&amp;gotoUrl=http%3A%2F%2Fwww.ti.com%2Flit%2Fgpn%2Flm5160a&src-supplier=Digi-Key; ComponentLink2Description: http://www.ti.com/general/docs/suppproductinfo.tsp?distId=10&amp;gotoUrl=http%3A%2F%2Fwww.ti.com%2Flit%2Fgpn%2Flm5160a&src-supplier=Digi-Key; Supplier Part Number 1: 296-46121-6-ND; LCSC Part Number: C473375; Item Type: IC
footprint 12-WSON (4x4)
pins: 1 AGND, 2 PGND, 3 VIN, 4 EN/UVLO, 5 RON, 6 SS, 7 FPWM, 8 FB, 9 VCC, 10 BST, 11 SW, 12 SW, 13 GND

## LM5176QPWPRQ1
designator U?
IC POWER REGULATOR; Manufacturer: Texas Instruments; Manufacturer Part Number: LM5176QPWPRQ1; Supplier: Mouser; LCSC Part Number: C2860809; RoHS: Yes; Item Type: IC; Stock: 7665; Pricing: 1=5.61, 10=5.37, 50=5.24, 100=4.96, 1000=4.47, 10000=4.4 (USD)
footprint HTSSOP-28-EP
pins: 1 EN/UVLO, 2 VIN, 3 VISNS, 4 MODE, 5 DITH, 6 RT, 7 SLOPE, 8 SS, 9 COMP, 10 AGND, 11 FB, 12 VOSNS, 13 ISNS(-), 14 ISNS(+), 15 CSG, 16 CS, 17 PGOOD, 18 SW2, 19 HDRV2, 20 BOOT2, 21 LDRV2, 22 PGND, 23 VCC, 24 BIAS, 25 LDRV1, 26 BOOT1, 27 HDRV1, 28 SW1, 29 EP

## LM7805CT
designator U?
1.5A null 5V positive 35V TO-220 Linear Voltage Regulators (LDO) ROHS; Manufacturer: Shanghai Siproin Microelectronics; Manufacturer Part Number: LM7805CT; Item Type: IC; Package: TO-220; LCSC Part Number: C5444281; ComponentLink1Description: LCSC; ComponentLink1URL: https://www.lcsc.com/product-detail/Linear-Voltage-Regulators-LDO_Shanghai-Siproin-Microelectronics-LM7805CT_C5444281.html
footprint TO-220
pins: 1 VIN, 2 GND, 3 VOUT

## LM25118Q1MHX/NOPB
designator U?
IC REG CTRLR BUCK 20TSSOP; Manufacturer: TI National Semiconductor; Manufacturer Part Number: LM25118Q1MHX/NOPB; Supplier: Mouser; Supplier Part Number: 595-LM25118Q1MHXNOPB; RoHS: Yes; Category: Voltage Regulators - Switching; Stock: 4751; Pricing: 1=6.11, 10=5.19, 50=5.19, 100=4.5, 1000=3.23, 10000=2.97 (USD); ComponentLink1URL: https://datasheet.ciiva.com/6593/lm25118-6593725.pdf?src-supplier=Digikey; ComponentLink1Description: https://datasheet.ciiva.com/6593/lm25118-6593725.pdf?src-supplier=Digikey; LCSC Part Number: C529284; Item Type: IC
footprint 20-HTSSOP
pins: 1 VIN, 2 UVLO, 3 RT, 4 EN, 5 RAMP, 6 AGND, 7 SS, 8 FB, 9 COMP, 10 VOUT, 11 SYNC, 12 CS, 13 CSG, 14 PGND, 15 LO, 16 VCC, 17 VCCX, 18 HB, 19 HO, 20 HS, 21 EP

## LM25145RGYR
designator U?
Buck Regulator Positive Output Step-Down DC-DC Controller IC 20-VQFN (3.5x4.5); Manufacturer: Texas Instruments; Manufacturer Part Number: LM25145RGYR; Supplier: Mouser; LCSC Part Number: C2876740; RoHS: Yes; Item Type: IC; Stock: 5164; Pricing: 1=1.94, 10=1.48, 50=1.35, 100=1.2, 1000=1.1, 10000=1 (USD); ComponentLink1URL: http://www.ti.com/lit/pdf/slyt741?src-supplier=Digikey; ComponentLink1Description: http://www.ti.com/lit/pdf/slyt741?src-supplier=Digikey
footprint 20-VQFN (3.5x4.5)
pins: 1 EN/UVLO, 2 RT, 3 SS/TRK, 4 COMP, 5 FB, 6 AGND, 7 SYNCOUT, 8 SYNCIN, 9 NC, 10 PGOOD, 11 ILIM, 12 PGND, 13 LO, 14 VCC, 15 EP, 16 NC, 17 BST, 18 HO, 19 SW, 20 VIN, 21 EP

## LM65645SRZTRQ1
designator U?
Buck Switching Regulator IC Positive Adjustable (Fixed) 0.8V (3.3V, 5V) 1 Output 4.5A 20-WFQFN Exposed Pad; Manufacturer: Texas Instruments; Manufacturer Part Number: LM65645SRZTRQ1; Supplier: DigiKey; LCSC Part Number: C49256228; Item Type: IC
pins: 1 NC, 2 PG, 3 FB, 4 VCC, 5 MODE / SYNC, 6 RT, 7 EN / UVLO, 8 NC, 9 PGND1, 10 NC, 11 VIN1, 12 NC, 13 SW1, 14 SW2, 15 BOOT, 16 NC, 17 VIN2, 18 NC, 19 PGND2, 20 BIAS, 21 DAP

## LMQ66430MC3RXBRQ1
designator U?
IC REG BUCK ADJ/1V 3A 14VQFN; Manufacturer: Texas Instruments; Manufacturer Part Number: LMQ66430MC3RXBRQ1; Supplier: Mouser; LCSC Part Number: C19271903; RoHS: No; Item Type: IC; Pricing: 1=3.89, 10=2.71, 50=2.71, 100=2.45, 1000=2.18, 10000=2.1 (USD)
footprint 14-VQFN (2.6x2.6)
pins: 1 EN/UVLO, 2 NC, 3 VIN, 4 NC, 5 NC, 6 PGND, 7 SW, 8 BOOT, 9 NC, 10 VCC, 11 VOUT/FB, 12 NC, 13 MODE/SYNC, 14 PG, 15 GND/DAP